# Altium footprint library MY_LIB_Connectors.PcbLib: 358 footprints (part 23 of 23)
Each footprint in its own frame and in the unit in brackets; x right, y up, seen from the top. Pads: shape width x height; smd on the part's side, far side on the other; paste and mask are expansions set on the pad; w line width, h text height; cw(c..) or ccw(c..) is an arc to the next point about the centre after c.
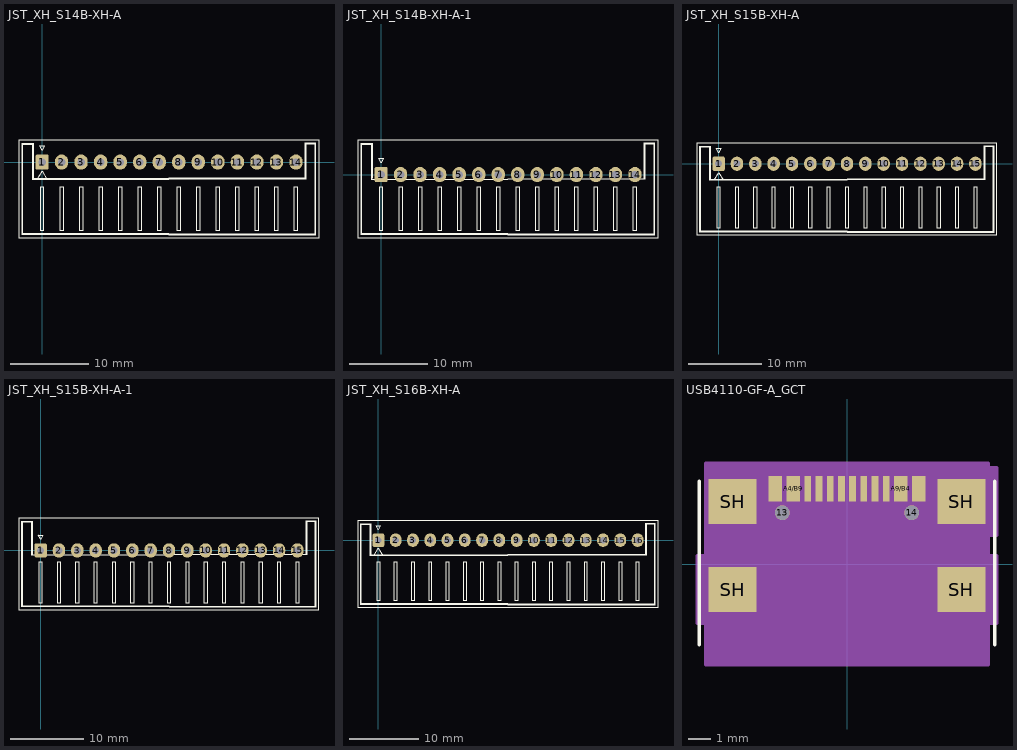
[diagram p22: the footprints below, top view; thin cyan lines are the x and y axes]

## JST_XH_S14B-XH-A [mm] "JST S14B-XH-A; reviewed KiCad footprint; ready STEP reference model"
height 6.1
pads (14):
  rrect29% 1.7x1.95 hole 0.95: 1(0,0)
  oval 1.7x1.95 hole 0.95: 2(2.5,0) 3(5,0) 4(7.5,0) 5(10,0) 6(12.5,0) 7(15,0) 8(17.5,0) 9(20,0) 10(22.5,0) 11(25,0) 12(27.5,0) 13(30,0) 14(32.5,0)
Top Overlay:
  lines w0.05: -2.95,-9.7 -2.95,2.81 35.45,2.81 35.45,-9.7 -2.95,-9.7
  lines w0.1: -0.625,-2.2 0,-1.2 0.625,-2.2 ; -2.45,-9.2 -2.45,2.3 -1.25,2.3 -1.25,-2.2 16.25,-2.2 33.75,-2.2 33.75,2.3 34.95,2.3 34.95,-9.2 16.25,-9.2 -2.45,-9.2
  lines w0.12: -2.56,-9.31 -2.56,2.41 -1.14,2.41 -1.14,-2.09 16.25,-2.09 33.64,-2.09 33.64,2.41 35.06,2.41 35.06,-9.31 16.25,-9.31 -2.56,-9.31 ; -0.3,2.1 0.3,2.1 0,1.5 -0.3,2.1 ; -0.25,-8.7 -0.25,-3.2 0.25,-3.2 0.25,-8.7 -0.25,-8.7 ; 2.25,-8.7 2.25,-3.2 2.75,-3.2 2.75,-8.7 2.25,-8.7 ; 4.75,-8.7 4.75,-3.2 5.25,-3.2 5.25,-8.7 4.75,-8.7 ; 7.25,-8.7 7.25,-3.2 7.75,-3.2 7.75,-8.7 7.25,-8.7 ; 9.75,-8.7 9.75,-3.2 10.25,-3.2 10.25,-8.7 9.75,-8.7 ; 12.25,-8.7 12.25,-3.2 12.75,-3.2 12.75,-8.7 12.25,-8.7 ; 14.75,-8.7 14.75,-3.2 15.25,-3.2 15.25,-8.7 14.75,-8.7 ; 17.25,-8.7 17.25,-3.2 17.75,-3.2 17.75,-8.7 17.25,-8.7 ; 19.75,-8.7 19.75,-3.2 20.25,-3.2 20.25,-8.7 19.75,-8.7 ; 22.25,-8.7 22.25,-3.2 22.75,-3.2 22.75,-8.7 22.25,-8.7 ; 24.75,-8.7 24.75,-3.2 25.25,-3.2 25.25,-8.7 24.75,-8.7 ; 27.25,-8.7 27.25,-3.2 27.75,-3.2 27.75,-8.7 27.25,-8.7 ; 29.75,-8.7 29.75,-3.2 30.25,-3.2 30.25,-8.7 29.75,-8.7 ; 32.25,-8.7 32.25,-3.2 32.75,-3.2 32.75,-8.7 32.25,-8.7
3D body "JST_XH_S14B-XH-A_1x14_P2.50mm_Horizontal.step": height 6.1, standoff -3.4, extent -2.45,-9.2 34.95,2.3

## JST_XH_S14B-XH-A-1 [mm] "JST S14B-XH-A-1; reviewed KiCad footprint; ready STEP reference model"
height 6.1
pads (14):
  rrect29% 1.7x1.95 hole 0.95: 1(0,0)
  oval 1.7x1.95 hole 0.95: 2(2.5,0) 3(5,0) 4(7.5,0) 5(10,0) 6(12.5,0) 7(15,0) 8(17.5,0) 9(20,0) 10(22.5,0) 11(25,0) 12(27.5,0) 13(30,0) 14(32.5,0)
Top Overlay:
  lines w0.05: -2.95,-8.1 -2.95,4.4 35.45,4.4 35.45,-8.1 -2.95,-8.1
  lines w0.1: -0.625,-0.6 0,0.4 0.625,-0.6 ; -2.45,-7.6 -2.45,3.9 -1.25,3.9 -1.25,-0.6 16.25,-0.6 33.75,-0.6 33.75,3.9 34.95,3.9 34.95,-7.6 16.25,-7.6 -2.45,-7.6
  lines w0.12: -1.14,-0.49 -1.14,4.01 -2.56,4.01 -2.56,-7.71 16.25,-7.71 35.06,-7.71 35.06,4.01 33.64,4.01 33.64,-0.49 ; -0.3,2.1 0.3,2.1 0,1.5 -0.3,2.1 ; -0.25,-7.1 -0.25,-1.6 0.25,-1.6 0.25,-7.1 -0.25,-7.1 ; 2.25,-7.1 2.25,-1.6 2.75,-1.6 2.75,-7.1 2.25,-7.1 ; 4.75,-7.1 4.75,-1.6 5.25,-1.6 5.25,-7.1 4.75,-7.1 ; 7.25,-7.1 7.25,-1.6 7.75,-1.6 7.75,-7.1 7.25,-7.1 ; 9.75,-7.1 9.75,-1.6 10.25,-1.6 10.25,-7.1 9.75,-7.1 ; 12.25,-7.1 12.25,-1.6 12.75,-1.6 12.75,-7.1 12.25,-7.1 ; 14.75,-7.1 14.75,-1.6 15.25,-1.6 15.25,-7.1 14.75,-7.1 ; 17.25,-7.1 17.25,-1.6 17.75,-1.6 17.75,-7.1 17.25,-7.1 ; 19.75,-7.1 19.75,-1.6 20.25,-1.6 20.25,-7.1 19.75,-7.1 ; 22.25,-7.1 22.25,-1.6 22.75,-1.6 22.75,-7.1 22.25,-7.1 ; 24.75,-7.1 24.75,-1.6 25.25,-1.6 25.25,-7.1 24.75,-7.1 ; 27.25,-7.1 27.25,-1.6 27.75,-1.6 27.75,-7.1 27.25,-7.1 ; 29.75,-7.1 29.75,-1.6 30.25,-1.6 30.25,-7.1 29.75,-7.1 ; 32.25,-7.1 32.25,-1.6 32.75,-1.6 32.75,-7.1 32.25,-7.1
3D body "JST_XH_S14B-XH-A-1_1x14_P2.50mm_Horizontal.step": height 6.1, standoff -3.4, extent -2.45,-7.6 34.95,3.9

## JST_XH_S15B-XH-A [mm] "JST S15B-XH-A; reviewed KiCad footprint; ready STEP reference model"
height 6.1
pads (15):
  rrect29% 1.7x1.95 hole 0.95: 1(0,0)
  oval 1.7x1.95 hole 0.95: 2(2.5,0) 3(5,0) 4(7.5,0) 5(10,0) 6(12.5,0) 7(15,0) 8(17.5,0) 9(20,0) 10(22.5,0) 11(25,0) 12(27.5,0) 13(30,0) 14(32.5,0) 15(35,0)
Top Overlay:
  lines w0.05: -2.95,-9.7 -2.95,2.81 37.95,2.81 37.95,-9.7 -2.95,-9.7
  lines w0.1: -0.625,-2.2 0,-1.2 0.625,-2.2 ; -2.45,-9.2 -2.45,2.3 -1.25,2.3 -1.25,-2.2 17.5,-2.2 36.25,-2.2 36.25,2.3 37.45,2.3 37.45,-9.2 17.5,-9.2 -2.45,-9.2
  lines w0.12: -2.56,-9.31 -2.56,2.41 -1.14,2.41 -1.14,-2.09 17.5,-2.09 36.14,-2.09 36.14,2.41 37.56,2.41 37.56,-9.31 17.5,-9.31 -2.56,-9.31 ; -0.3,2.1 0.3,2.1 0,1.5 -0.3,2.1 ; -0.25,-8.7 -0.25,-3.2 0.25,-3.2 0.25,-8.7 -0.25,-8.7 ; 2.25,-8.7 2.25,-3.2 2.75,-3.2 2.75,-8.7 2.25,-8.7 ; 4.75,-8.7 4.75,-3.2 5.25,-3.2 5.25,-8.7 4.75,-8.7 ; 7.25,-8.7 7.25,-3.2 7.75,-3.2 7.75,-8.7 7.25,-8.7 ; 9.75,-8.7 9.75,-3.2 10.25,-3.2 10.25,-8.7 9.75,-8.7 ; 12.25,-8.7 12.25,-3.2 12.75,-3.2 12.75,-8.7 12.25,-8.7 ; 14.75,-8.7 14.75,-3.2 15.25,-3.2 15.25,-8.7 14.75,-8.7 ; 17.25,-8.7 17.25,-3.2 17.75,-3.2 17.75,-8.7 17.25,-8.7 ; 19.75,-8.7 19.75,-3.2 20.25,-3.2 20.25,-8.7 19.75,-8.7 ; 22.25,-8.7 22.25,-3.2 22.75,-3.2 22.75,-8.7 22.25,-8.7 ; 24.75,-8.7 24.75,-3.2 25.25,-3.2 25.25,-8.7 24.75,-8.7 ; 27.25,-8.7 27.25,-3.2 27.75,-3.2 27.75,-8.7 27.25,-8.7 ; 29.75,-8.7 29.75,-3.2 30.25,-3.2 30.25,-8.7 29.75,-8.7 ; 32.25,-8.7 32.25,-3.2 32.75,-3.2 32.75,-8.7 32.25,-8.7 ; 34.75,-8.7 34.75,-3.2 35.25,-3.2 35.25,-8.7 34.75,-8.7
3D body "JST_XH_S15B-XH-A_1x15_P2.50mm_Horizontal.step": height 6.1, standoff -3.4, extent -2.45,-9.2 37.45,2.3

## JST_XH_S15B-XH-A-1 [mm] "JST S15B-XH-A-1; reviewed KiCad footprint; ready STEP reference model"
height 6.1
pads (15):
  rrect29% 1.7x1.95 hole 0.95: 1(0,0)
  oval 1.7x1.95 hole 0.95: 2(2.5,0) 3(5,0) 4(7.5,0) 5(10,0) 6(12.5,0) 7(15,0) 8(17.5,0) 9(20,0) 10(22.5,0) 11(25,0) 12(27.5,0) 13(30,0) 14(32.5,0) 15(35,0)
Top Overlay:
  lines w0.05: -2.95,-8.1 -2.95,4.4 37.95,4.4 37.95,-8.1 -2.95,-8.1
  lines w0.1: -0.625,-0.6 0,0.4 0.625,-0.6 ; -2.45,-7.6 -2.45,3.9 -1.25,3.9 -1.25,-0.6 17.5,-0.6 36.25,-0.6 36.25,3.9 37.45,3.9 37.45,-7.6 17.5,-7.6 -2.45,-7.6
  lines w0.12: -1.14,-0.49 -1.14,4.01 -2.56,4.01 -2.56,-7.71 17.5,-7.71 37.56,-7.71 37.56,4.01 36.14,4.01 36.14,-0.49 ; -0.3,2.1 0.3,2.1 0,1.5 -0.3,2.1 ; -0.25,-7.1 -0.25,-1.6 0.25,-1.6 0.25,-7.1 -0.25,-7.1 ; 2.25,-7.1 2.25,-1.6 2.75,-1.6 2.75,-7.1 2.25,-7.1 ; 4.75,-7.1 4.75,-1.6 5.25,-1.6 5.25,-7.1 4.75,-7.1 ; 7.25,-7.1 7.25,-1.6 7.75,-1.6 7.75,-7.1 7.25,-7.1 ; 9.75,-7.1 9.75,-1.6 10.25,-1.6 10.25,-7.1 9.75,-7.1 ; 12.25,-7.1 12.25,-1.6 12.75,-1.6 12.75,-7.1 12.25,-7.1 ; 14.75,-7.1 14.75,-1.6 15.25,-1.6 15.25,-7.1 14.75,-7.1 ; 17.25,-7.1 17.25,-1.6 17.75,-1.6 17.75,-7.1 17.25,-7.1 ; 19.75,-7.1 19.75,-1.6 20.25,-1.6 20.25,-7.1 19.75,-7.1 ; 22.25,-7.1 22.25,-1.6 22.75,-1.6 22.75,-7.1 22.25,-7.1 ; 24.75,-7.1 24.75,-1.6 25.25,-1.6 25.25,-7.1 24.75,-7.1 ; 27.25,-7.1 27.25,-1.6 27.75,-1.6 27.75,-7.1 27.25,-7.1 ; 29.75,-7.1 29.75,-1.6 30.25,-1.6 30.25,-7.1 29.75,-7.1 ; 32.25,-7.1 32.25,-1.6 32.75,-1.6 32.75,-7.1 32.25,-7.1 ; 34.75,-7.1 34.75,-1.6 35.25,-1.6 35.25,-7.1 34.75,-7.1
3D body "JST_XH_S15B-XH-A-1_1x15_P2.50mm_Horizontal.step": height 6.1, standoff -3.4, extent -2.45,-7.6 37.45,3.9

## JST_XH_S16B-XH-A [mm] "JST S16B-XH-A; reviewed KiCad footprint; ready STEP reference model"
height 6.1
pads (16):
  rrect29% 1.7x1.95 hole 0.95: 1(0,0)
  oval 1.7x1.95 hole 0.95: 2(2.5,0) 3(5,0) 4(7.5,0) 5(10,0) 6(12.5,0) 7(15,0) 8(17.5,0) 9(20,0) 10(22.5,0) 11(25,0) 12(27.5,0) 13(30,0) 14(32.5,0) 15(35,0) 16(37.5,0)
Top Overlay:
  lines w0.05: -2.95,-9.7 -2.95,2.81 40.45,2.81 40.45,-9.7 -2.95,-9.7
  lines w0.1: -0.625,-2.2 0,-1.2 0.625,-2.2 ; -2.45,-9.2 -2.45,2.3 -1.25,2.3 -1.25,-2.2 18.75,-2.2 38.75,-2.2 38.75,2.3 39.95,2.3 39.95,-9.2 18.75,-9.2 -2.45,-9.2
  lines w0.12: -2.56,-9.31 -2.56,2.41 -1.14,2.41 -1.14,-2.09 18.75,-2.09 38.64,-2.09 38.64,2.41 40.06,2.41 40.06,-9.31 18.75,-9.31 -2.56,-9.31 ; -0.3,2.1 0.3,2.1 0,1.5 -0.3,2.1 ; -0.25,-8.7 -0.25,-3.2 0.25,-3.2 0.25,-8.7 -0.25,-8.7 ; 2.25,-8.7 2.25,-3.2 2.75,-3.2 2.75,-8.7 2.25,-8.7 ; 4.75,-8.7 4.75,-3.2 5.25,-3.2 5.25,-8.7 4.75,-8.7 ; 7.25,-8.7 7.25,-3.2 7.75,-3.2 7.75,-8.7 7.25,-8.7 ; 9.75,-8.7 9.75,-3.2 10.25,-3.2 10.25,-8.7 9.75,-8.7 ; 12.25,-8.7 12.25,-3.2 12.75,-3.2 12.75,-8.7 12.25,-8.7 ; 14.75,-8.7 14.75,-3.2 15.25,-3.2 15.25,-8.7 14.75,-8.7 ; 17.25,-8.7 17.25,-3.2 17.75,-3.2 17.75,-8.7 17.25,-8.7 ; 19.75,-8.7 19.75,-3.2 20.25,-3.2 20.25,-8.7 19.75,-8.7 ; 22.25,-8.7 22.25,-3.2 22.75,-3.2 22.75,-8.7 22.25,-8.7 ; 24.75,-8.7 24.75,-3.2 25.25,-3.2 25.25,-8.7 24.75,-8.7 ; 27.25,-8.7 27.25,-3.2 27.75,-3.2 27.75,-8.7 27.25,-8.7 ; 29.75,-8.7 29.75,-3.2 30.25,-3.2 30.25,-8.7 29.75,-8.7 ; 32.25,-8.7 32.25,-3.2 32.75,-3.2 32.75,-8.7 32.25,-8.7 ; 34.75,-8.7 34.75,-3.2 35.25,-3.2 35.25,-8.7 34.75,-8.7 ; 37.25,-8.7 37.25,-3.2 37.75,-3.2 37.75,-8.7 37.25,-8.7
3D body "JST_XH_S16B-XH-A_1x16_P2.50mm_Horizontal.step": height 6.1, standoff -3.4, extent -2.45,-9.2 39.95,2.3

## USB4110-GF-A_GCT [mil] "GCT USB4110-GF-A; corrected shell mask +0.05mm/paste 0mm; embedded community STEP"
height 128.35
pads (18):
  round 26 hole 26 unplated paste-99999 mask+0: 13(-113.78,90.07) 14(113.78,90.07)
  rect 24x45 smd paste+0 mask+0: A1/B12(-125.98,132.39) A4/B9(-94.49,132.39) A9/B4(94.49,132.39) A12/B1(125.98,132.39)
  rect 12x45 smd paste+0 mask+0: A5(-49.21,132.39) A6(-9.84,132.39) A7(9.84,132.39) A8(49.21,132.39) B5(68.9,132.39) B6(29.53,132.39) B7(-29.53,132.39) B8(-68.9,132.39)
  rect 85x79 smd paste+0 mask+1.97: SH(-201.18,-44.97) SH(-201.18,109.76) SH(201.18,-44.97) SH(201.18,109.76)
Top Overlay:
  lines w5.91: -259.84,-141.73 -259.84,145.67 ; 259.84,-141.73 259.84,145.67
Mechanical 13:
  lines w1: -228.5,-157 228.5,-157 228.5,157 -228.5,157 -228.5,-157
  text ".Designator" at -137.5,107.39 h50
  text "*" at -238.48,107.39 h50
Mechanical 15:
  region: -263.68,-104.47 -248.5,-104.47 -248.5,-177 248.5,-177 248.5,-104.47 263.68,-104.47 263.68,14.53 248.5,14.53 248.5,50.26 263.68,50.26 263.68,169.26 248.5,169.26 248.5,177 -248.5,177 -248.5,14.53 -263.68,14.53
  lines w6: -263.68,-104.47 -248.5,-104.47 -248.5,-177 248.5,-177 248.5,-104.47 263.68,-104.47 263.68,14.53 248.5,14.53 248.5,50.26 263.68,50.26 263.68,169.26 248.5,169.26 248.5,177 -248.5,177 -248.5,14.53 -263.68,14.53 -263.68,-104.47
3D body "USB4110-GF-A.step": height 128.35, standoff -24.61, extent -222.44,-157.29 222.44,145.86